# EAGLE library part MP2315SGJ-P (library MP2315SGJ-P)
Switching Voltage Regulators 3A 24V Hi Effc.Sync Step Down Converter Source: Datasheet <https://www.monolithicpower.com/pub/media/document/MP2315S_r1.0.pdf>
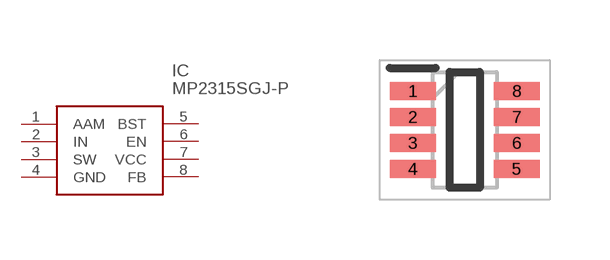
[diagram p0: symbol with the pads of SOT65P280X100-8N; footprint SOT65P280X100-8N]

Designator prefix IC

## MP2315SGJ-P (Description: Switching Voltage Regulators 3A 24V Hi Effc.Sync Step Down Converter; Height: 1mm; Manufacturer_Name: Monolithic Power Systems (MPS); Manufacturer_Part_Number: MP2315SGJ-P; Mouser_Part_Number: 946-MP2315SGJ-P; Mouser_Price-Stock: https://www.mouser.co.uk/ProductDetail/Monolithic-Power-Systems-MPS/MP2315SGJ-P?qs=Zwj7mHVHPHRNCucLjW2rNg%3D%3D)  [SOT65P280X100-8N]
1  AAM
2  IN
3  SW
4  GND
5  BST
6  EN
7  VCC
8  FB

## Footprint SOT65P280X100-8N (pad centres in mm)
TSOT23-8
smd 1.15 x 0.45: 1 -1.3,0.975; 2 -1.3,0.325; 3 -1.3,-0.325; 4 -1.3,-0.975; 5 1.3,-0.975; 6 1.3,-0.325; 7 1.3,0.325; 8 1.3,0.975